# Altium schematic symbol library sch_tc.SchLib: 1 symbol
Pins are listed as number, name and electrical type; pins without a type are passive.

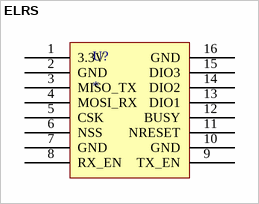
[diagram p0: symbol ELRS]

## ELRS
designator U?
footprint pcb_tc
pins: 1 3.3V, 2 GND, 3 MISO_TX, 4 MOSI_RX, 5 CSK, 6 NSS, 7 GND, 8 RX_EN, 9 TX_EN, 10 GND, 11 NRESET, 12 BUSY, 13 DIO1, 14 DIO2, 15 DIO3, 16 GND